# Altium footprint library IFSC2020DEER4R7M01.PcbLib: 1 footprints
Each footprint in its own frame and in the unit in brackets; x right, y up, seen from the top. Pads: shape width x height; smd on the part's side, far side on the other; paste and mask are expansions set on the pad; w line width, h text height; cw(c..) or ccw(c..) is an arc to the next point about the centre after c.
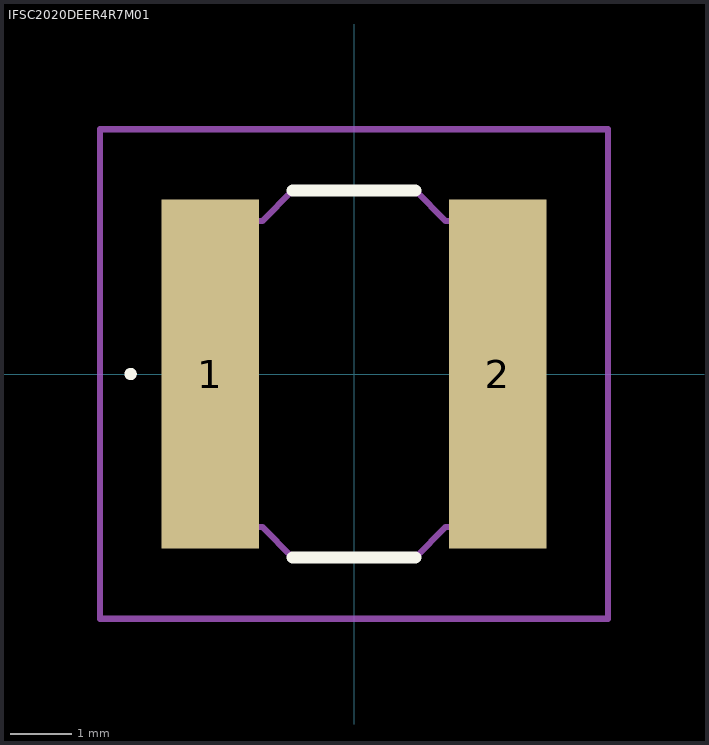
[diagram p0: the footprint, top view; thin cyan lines are the x and y axes]

## IFSC2020DEER4R7M01 [mm]
pads (2):
  rect 1.6x5.7 smd: 1(-2.35,0) 2(2.35,0)
Top Overlay:
  lines w0.1: -3.7,0 cw(c-3.65,0) -3.6,0 ; -3.7,0 -3.7,0 ; -3.7,0 ccw(c-3.65,0) -3.6,0 ; -3.6,0 -3.6,0
  lines w0.2: -1,-3 1,-3 ; -1,3 1,3
Mechanical 15:
  lines w0.1: 1,3 1.5,2.5 3,2.5 3,-2.5 1.5,-2.5 1,-3 -1,-3 -1.5,-2.5 -3,-2.5 -3,2.5 -1.5,2.5 -1,3 0,3 1,3 ; 1,3 1,3
Mechanical 20:
  lines w0.1: -4.15,-4 4.15,-4 4.15,4 -4.15,4 -4.15,-4